# Altium schematic symbol library 47 µH inductor.SchLib: 1 symbol
Pins are listed as number, name and electrical type; pins without a type are passive.

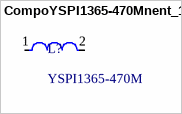
[diagram p0: symbol CompoYSPI1365-470Mnent_1]

## CompoYSPI1365-470Mnent_1
designator L?, comment YSPI1365-470M
47 µH inductor; JLCPCB Part #: C497913
footprint L_YSPI1365_470M (YJYCOIN YSPI1365-470M, 47uH, SMD Power Inductor, JLCPCB C497913)
pins: 1, 2